# Altium schematic symbol library 2020-06-27_15-02-51.SchLib: 2 symbols
Pins are listed as number, name and electrical type; pins without a type are passive.

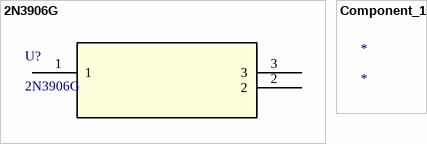
[diagram p0: symbols 2N3906G to Component_1]

## 2N3906G
designator U?
No Description Available; Vendor: ON Semiconductor; Built_By: EMA_UL_Team; SourceLibrary: ON_Semi_2010-01-01; Manufacturer_Part_Number: 2N3906G; Copyright: Copyright (C) 2018 Accelerated Designs. All rights reserved; RefDes: RefDes; Type: DEV
footprint TO-92_ONS
pins: 1, 2, 3

## Component_1
designator *